# Altium footprint library header.PcbLib: 139 footprints (part 4 of 9)
Each footprint in its own frame and in the unit in brackets; x right, y up, seen from the top. Pads: shape width x height; smd on the part's side, far side on the other; paste and mask are expansions set on the pad; w line width, h text height; cw(c..) or ccw(c..) is an arc to the next point about the centre after c.
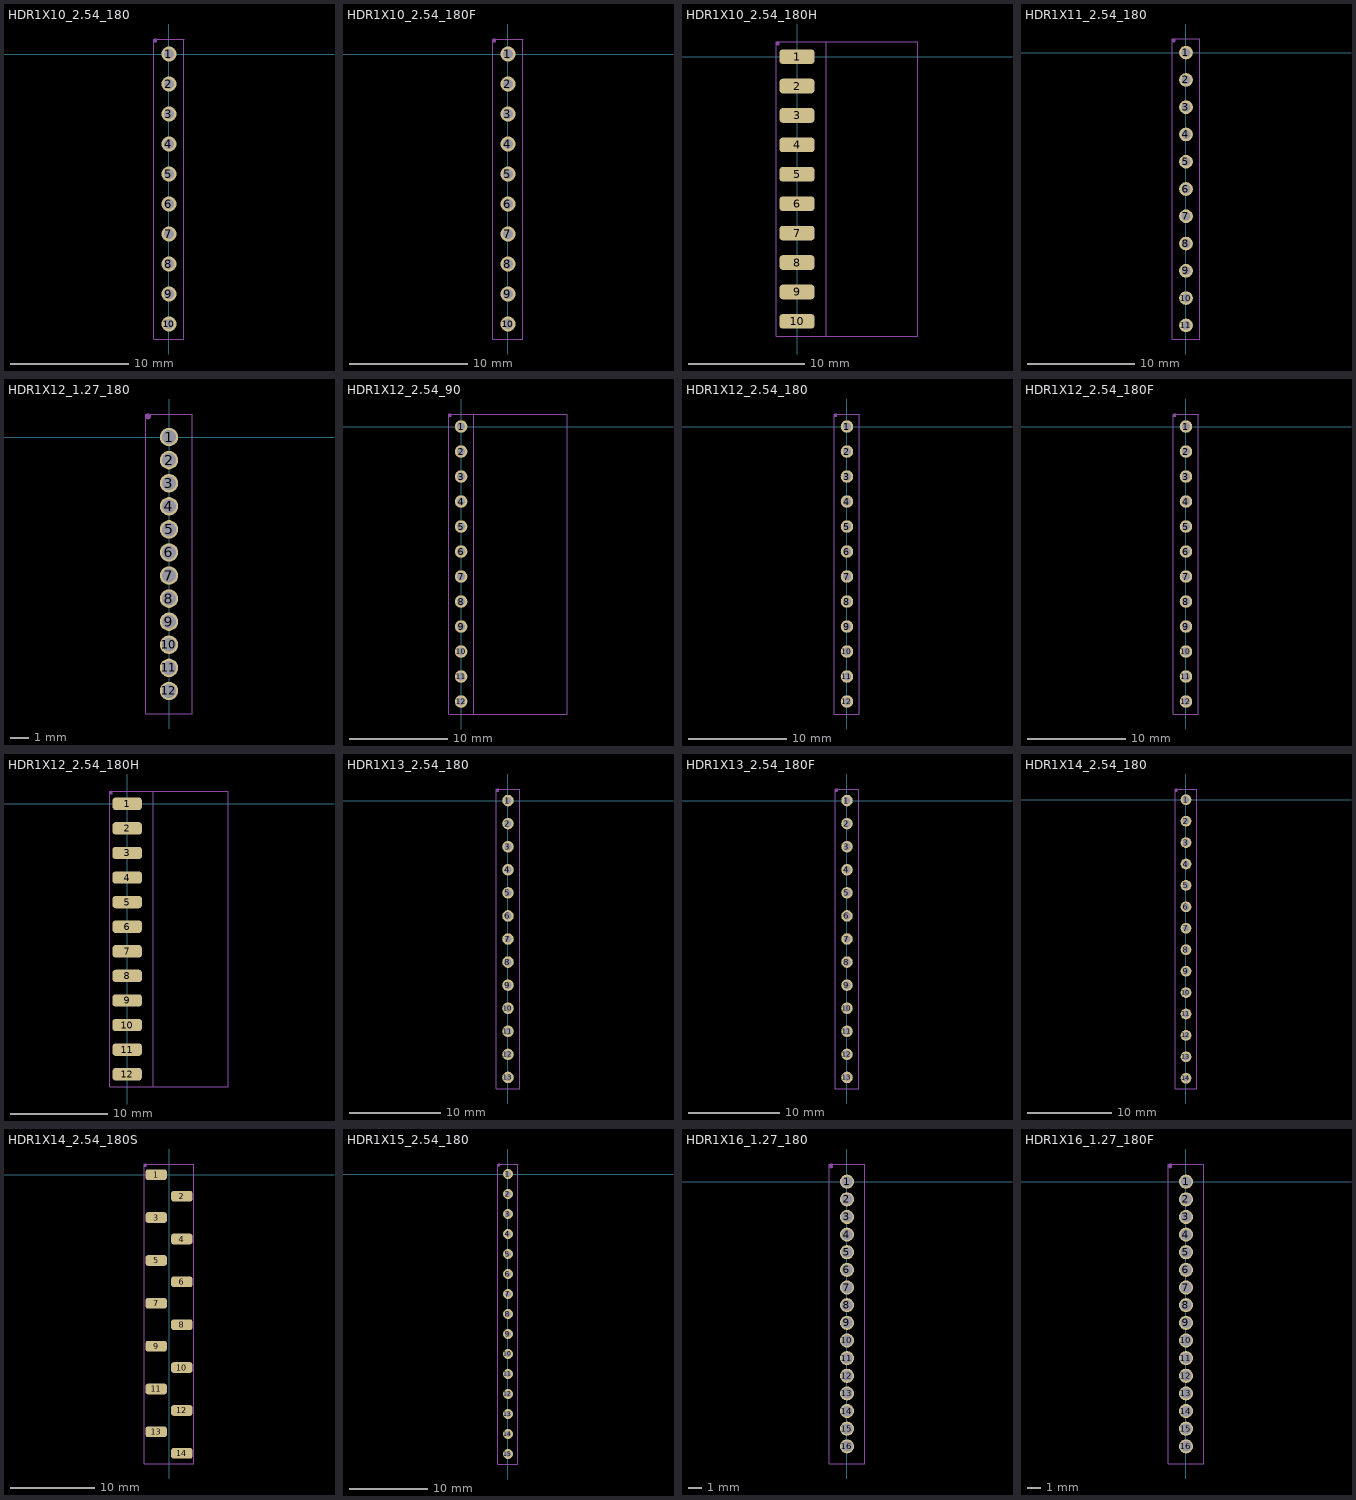
[diagram p3: the footprints below, top view; thin cyan lines are the x and y axes]

## HDR1X10_2.54_180 [mil]
height 169.29
pads (10):
  round 50 hole 32: 1(0,0) 2(0,-100) 3(0,-200) 4(0,-300) 5(0,-400) 6(0,-500) 7(0,-600) 8(0,-700) 9(0,-800) 10(0,-900)
Mechanical 13:
  lines w2: -50,-950 -50,50 50,50 50,-950 -50,-950
Top Component (Mech14):
  circle w2: c-45,45 r5
  region: -45,40 -45.99,40 -47.83,40.76 -49.24,42.17 -50,44.01 -50,45 -50,45.99 -49.24,47.83 -47.83,49.24 -45.99,50 -45,50 -44.01,50 -42.17,49.24 -40.76,47.83 -40,45.99 -40,45 -40,44.01 -40.76,42.17 -42.17,40.76 -44.01,40
  lines w2: -50,-950 50,-950 50,50 -50,50 -50,-950
  text ".Designator" at -31,-470 h80
3D body "pin_header_aw140-eg-g10d.stp": height 322.83, standoff -118.11, extent -49.18,-950 49.18,50

## HDR1X10_2.54_180F [mil]
height 169.29
pads (10):
  round 50 hole 32: 1(0,0) 2(0,-100) 3(0,-200) 4(0,-300) 5(0,-400) 6(0,-500) 7(0,-600) 8(0,-700) 9(0,-800) 10(0,-900)
Mechanical 13:
  lines w2: -50,-950 50,-950 50,50 -50,50 -50,-950
Top Component (Mech14):
  circle w2: c-45,45 r5
  region: -45,40 -45.99,40 -47.83,40.76 -49.24,42.17 -50,44.01 -50,45 -50,45.99 -49.24,47.83 -47.83,49.24 -45.99,50 -45,50 -44.01,50 -42.17,49.24 -40.76,47.83 -40,45.99 -40,45 -40,44.01 -40.76,42.17 -42.17,40.76 -44.01,40
  lines w2: -50,-950 -50,50 50,50 50,-950 -50,-950
  text ".Designator" at -31,-470 h80
3D body "female_header_a-bl254-eg-g10d.stp": height 334.65, standoff -125.98, extent -49.2,-954.92 49.22,54.92

## HDR1X10_2.54_180H [mil]
height 169.29
pads (10):
  rrect50% 120x50 smd: 1(0,0) 2(0,-100) 3(0,-200) 4(0,-300) 5(0,-400) 6(0,-500) 7(0,-600) 8(0,-700) 9(0,-800) 10(0,-900)
Mechanical 13:
  lines w2: -70,-950 -70,50 410,50 410,-950 -70,-950
Top Component (Mech14):
  circle w2: c-65,45 r5
  region: -65,40 -65.99,40 -67.83,40.76 -69.24,42.17 -70,44.01 -70,45 -70,45.99 -69.24,47.83 -67.83,49.24 -65.99,50 -65,50 -64.01,50 -62.17,49.24 -60.76,47.83 -60,45.99 -60,45 -60,44.01 -60.76,42.17 -62.17,40.76 -64.01,40
  lines w2: -70,-950 100,-950 100,50 -70,50 -70,-950
  text ".Designator" at -26,-470 h80
3D body "pin_header_aw140-eg-g10d.stp": height 61.32, standoff -37.05, extent -35,-950 405.94,50

## HDR1X11_2.54_180 [mil]
height 169.29
pads (11):
  round 50 hole 32: 1(0,0) 2(0,-100) 3(0,-200) 4(0,-300) 5(0,-400) 6(0,-500) 7(0,-600) 8(0,-700) 9(0,-800) 10(0,-900) 11(0,-1000)
Mechanical 13:
  lines w2: -50,-1050 50,-1050 50,50 -50,50 -50,-1050
Top Component (Mech14):
  circle w2: c-45,45 r5
  region: -45,40 -45.99,40 -47.83,40.76 -49.24,42.17 -50,44.01 -50,45 -50,45.99 -49.24,47.83 -47.83,49.24 -45.99,50 -45,50 -44.01,50 -42.17,49.24 -40.76,47.83 -40,45.99 -40,45 -40,44.01 -40.76,42.17 -42.17,40.76 -44.01,40
  lines w2: -50,-1050 50,-1050 50,50 -50,50 -50,-1050
  text ".Designator" at -31,-520 h80
3D body "pin_header_aw140-eg-g11d.stp": height 322.83, standoff -118.11, extent -49.18,-1050 49.18,50

## HDR1X12_1.27_180 [mil]
height 169.29
pads (12):
  round 40 hole 30: 1(0,0) 2(0,-50) 3(0,-100) 4(0,-150) 5(0,-200) 6(0,-250) 7(0,-300) 8(0,-350) 9(0,-400) 10(0,-450) 11(0,-500) 12(0,-550)
Mechanical 13:
  lines w2: -50,-600 -50,50 50,50 50,-600 -50,-600
Top Component (Mech14):
  circle w2: c-45,45 r5
  region: -45,40 -45.99,40 -47.83,40.76 -49.24,42.17 -50,44.01 -50,45 -50,45.99 -49.24,47.83 -47.83,49.24 -45.99,50 -45,50 -44.01,50 -42.17,49.24 -40.76,47.83 -40,45.99 -40,45 -40,44.01 -40.76,42.17 -42.17,40.76 -44.01,40
  lines w2: -50,-600 -50,50 50,50 50,-600 -50,-600
  text ".Designator" at -31,-295 h80
3D body "pin_header_a-sl127-eg-g12d.stp": height 210.24, standoff -102.36, extent -49.21,-575 49.21,25

## HDR1X12_2.54_90 [mil]
height 169.29
pads (12):
  round 50 hole 32: 1(0,0) 2(0,-100) 3(0,-200) 4(0,-300) 5(0,-400) 6(0,-500) 7(0,-600) 8(0,-700) 9(0,-800) 10(0,-900) 11(0,-1000) 12(0,-1100)
Mechanical 13:
  lines w2: -50,-1150 425,-1150 425,50 -50,50 -50,-1150
Top Component (Mech14):
  circle w2: c-45,45 r5
  region: -45,40 -45.99,40 -47.83,40.76 -49.24,42.17 -50,44.01 -50,45 -50,45.99 -49.24,47.83 -47.83,49.24 -45.99,50 -45,50 -44.01,50 -42.17,49.24 -40.76,47.83 -40,45.99 -40,45 -40,44.01 -40.76,42.17 -42.17,40.76 -44.01,40
  lines w2: -50,-1150 50,-1150 50,50 -50,50 -50,-1150
  text ".Designator" at -26,-570 h80
3D body "pin_header_aw140-ea-g12g.stp": height 99.21, standoff -93.7, extent -15,-1146.06 423.58,46.06

## HDR1X12_2.54_180 [mil]
height 169.29
pads (12):
  round 50 hole 32: 1(0,0) 2(0,-100) 3(0,-200) 4(0,-300) 5(0,-400) 6(0,-500) 7(0,-600) 8(0,-700) 9(0,-800) 10(0,-900) 11(0,-1000) 12(0,-1100)
Mechanical 13:
  lines w2: -50,-1150 -50,50 50,50 50,-1150 -50,-1150
Top Component (Mech14):
  circle w2: c-45,45 r5
  region: -45,40 -45.99,40 -47.83,40.76 -49.24,42.17 -50,44.01 -50,45 -50,45.99 -49.24,47.83 -47.83,49.24 -45.99,50 -45,50 -44.01,50 -42.17,49.24 -40.76,47.83 -40,45.99 -40,45 -40,44.01 -40.76,42.17 -42.17,40.76 -44.01,40
  lines w2: -50,-1150 -50,50 50,50 50,-1150 -50,-1150
  text ".Designator" at -31,-570 h80
3D body "pin_header_aw140-eg-g12d.stp": height 322.83, standoff -118.11, extent -49.18,-1150 49.18,50

## HDR1X12_2.54_180F [mil]
height 169.29
pads (12):
  round 50 hole 32: 1(0,0) 2(0,-100) 3(0,-200) 4(0,-300) 5(0,-400) 6(0,-500) 7(0,-600) 8(0,-700) 9(0,-800) 10(0,-900) 11(0,-1000) 12(0,-1100)
Mechanical 13:
  lines w2: -50,-1150 50,-1150 50,50 -50,50 -50,-1150
Top Component (Mech14):
  circle w2: c-45,45 r5
  region: -45,40 -45.99,40 -47.83,40.76 -49.24,42.17 -50,44.01 -50,45 -50,45.99 -49.24,47.83 -47.83,49.24 -45.99,50 -45,50 -44.01,50 -42.17,49.24 -40.76,47.83 -40,45.99 -40,45 -40,44.01 -40.76,42.17 -42.17,40.76 -44.01,40
  lines w2: -50,-1150 50,-1150 50,50 -50,50 -50,-1150
  text ".Designator" at -31,-570 h80
3D body "female_header_a-bl254-eg-g12d.stp": height 334.65, standoff -125.98, extent -49.21,-1154.92 49.21,54.92

## HDR1X12_2.54_180H [mil]
height 169.29
pads (12):
  rrect50% 120x50 smd: 1(0,0) 2(0,-100) 3(0,-200) 4(0,-300) 5(0,-400) 6(0,-500) 7(0,-600) 8(0,-700) 9(0,-800) 10(0,-900) 11(0,-1000) 12(0,-1100)
Mechanical 13:
  lines w2: -70,-1150 410,-1150 410,50 -70,50 -70,-1150
Top Component (Mech14):
  circle w2: c-65,45 r5
  region: -65,40 -65.99,40 -67.83,40.76 -69.24,42.17 -70,44.01 -70,45 -70,45.99 -69.24,47.83 -67.83,49.24 -65.99,50 -65,50 -64.01,50 -62.17,49.24 -60.76,47.83 -60,45.99 -60,45 -60,44.01 -60.76,42.17 -62.17,40.76 -64.01,40
  lines w2: -70,-1150 -70,50 105,50 105,-1150 -70,-1150
  text ".Designator" at -31,-570 h80
3D body "pin_header_aw140-eg-g12d.stp": height 49.32, standoff -49.05, extent -35,-1150 405.94,50

## HDR1X13_2.54_180 [mil]
height 169.29
pads (13):
  round 50 hole 32: 1(0,0) 2(0,-100) 3(0,-200) 4(0,-300) 5(0,-400) 6(0,-500) 7(0,-600) 8(0,-700) 9(0,-800) 10(0,-900) 11(0,-1000) 12(0,-1100) 13(0,-1200)
Mechanical 13:
  lines w2: -50,-1250 -50,50 50,50 50,-1250 -50,-1250
Top Component (Mech14):
  circle w2: c-45,45 r5
  region: -45,40 -45.99,40 -47.83,40.76 -49.24,42.17 -50,44.01 -50,45 -50,45.99 -49.24,47.83 -47.83,49.24 -45.99,50 -45,50 -44.01,50 -42.17,49.24 -40.76,47.83 -40,45.99 -40,45 -40,44.01 -40.76,42.17 -42.17,40.76 -44.01,40
  lines w2: -50,-1250 50,-1250 50,50 -50,50 -50,-1250
  text ".Designator" at -31,-620 h80
3D body "pin_header_aw140-eg-g13d.stp": height 322.83, standoff -118.11, extent -49.18,-1250 49.18,50

## HDR1X13_2.54_180F [mil]
height 169.29
pads (13):
  round 50 hole 32: 1(0,0) 2(0,-100) 3(0,-200) 4(0,-300) 5(0,-400) 6(0,-500) 7(0,-600) 8(0,-700) 9(0,-800) 10(0,-900) 11(0,-1000) 12(0,-1100) 13(0,-1200)
Mechanical 13:
  lines w2: -50,-1250 50,-1250 50,50 -50,50 -50,-1250
Top Component (Mech14):
  circle w2: c-45,45 r5
  region: -45,40 -45.99,40 -47.83,40.76 -49.24,42.17 -50,44.01 -50,45 -50,45.99 -49.24,47.83 -47.83,49.24 -45.99,50 -45,50 -44.01,50 -42.17,49.24 -40.76,47.83 -40,45.99 -40,45 -40,44.01 -40.76,42.17 -42.17,40.76 -44.01,40
  lines w2: -50,-1250 -50,50 50,50 50,-1250 -50,-1250
  text ".Designator" at -31,-620 h80
3D body "female_header_a-bl254-eg-g13d.stp": height 334.65, standoff -125.98, extent -49.2,-1254.91 49.22,54.92

## HDR1X14_2.54_180 [mil]
height 169.29
pads (14):
  round 50 hole 32: 1(0,0) 2(0,-100) 3(0,-200) 4(0,-300) 5(0,-400) 6(0,-500) 7(0,-600) 8(0,-700) 9(0,-800) 10(0,-900) 11(0,-1000) 12(0,-1100) 13(0,-1200) 14(0,-1300)
Mechanical 13:
  lines w2: -50,-1350 50,-1350 50,50 -50,50 -50,-1350
Top Component (Mech14):
  circle w2: c-45,45 r5
  region: -45,40 -45.99,40 -47.83,40.76 -49.24,42.17 -50,44.01 -50,45 -50,45.99 -49.24,47.83 -47.83,49.24 -45.99,50 -45,50 -44.01,50 -42.17,49.24 -40.76,47.83 -40,45.99 -40,45 -40,44.01 -40.76,42.17 -42.17,40.76 -44.01,40
  lines w2: -50,-1350 50,-1350 50,50 -50,50 -50,-1350
  text ".Designator" at -31,-670 h80
3D body "pin_header_aw140-eg-g14d.stp": height 322.83, standoff -118.11, extent -49.18,-1350 49.18,50

## HDR1X14_2.54_180S [mil]
height 169.29
pads (14):
  rrect50% 100x50 smd: 1(-60,0) 2(60,-100) 3(-60,-200) 4(60,-300) 5(-60,-400) 6(60,-500) 7(-60,-600) 8(60,-700) 9(-60,-800) 10(60,-900) 11(-60,-1000) 12(60,-1100) 13(-60,-1200) 14(60,-1300)
Mechanical 13:
  lines w2: -115,-1350 115,-1350 115,50 -115,50 -115,-1350
Top Component (Mech14):
  circle w2: c-110,45 r5
  region: -110,40 -110.99,40 -112.83,40.76 -114.24,42.17 -115,44.01 -115,45 -115,45.99 -114.24,47.83 -112.83,49.24 -110.99,50 -110,50 -109.01,50 -107.17,49.24 -105.76,47.83 -105,45.99 -105,45 -105,44.01 -105.76,42.17 -107.17,40.76 -109.01,40
  lines w2: -115,-1350 -115,50 115,50 115,-1350 -115,-1350
  text ".Designator" at -31,-670 h80
3D body "pin_header_A-SL254-EG-G14MP1.stp": height 386.46, standoff -0.94, extent -98.43,-1349.99 98.43,50.01

## HDR1X15_2.54_180 [mil]
height 169.29
pads (15):
  round 50 hole 32: 1(0,0) 2(0,-100) 3(0,-200) 4(0,-300) 5(0,-400) 6(0,-500) 7(0,-600) 8(0,-700) 9(0,-800) 10(0,-900) 11(0,-1000) 12(0,-1100) 13(0,-1200) 14(0,-1300) 15(0,-1400)
Mechanical 13:
  lines w2: -50,-1450 50,-1450 50,50 -50,50 -50,-1450
Top Component (Mech14):
  circle w2: c-45,45 r5
  region: -45,40 -45.99,40 -47.83,40.76 -49.24,42.17 -50,44.01 -50,45 -50,45.99 -49.24,47.83 -47.83,49.24 -45.99,50 -45,50 -44.01,50 -42.17,49.24 -40.76,47.83 -40,45.99 -40,45 -40,44.01 -40.76,42.17 -42.17,40.76 -44.01,40
  lines w2: -50,-1450 -50,50 50,50 50,-1450 -50,-1450
  text ".Designator" at -31,-720 h80
3D body "pin_header_aw140-eg-g15d.stp": height 322.83, standoff -118.11, extent -49.18,-1449.99 49.18,50

## HDR1X16_1.27_180 [mil]
height 169.29
pads (16):
  round 40 hole 30: 1(0,0) 2(0,-50) 3(0,-100) 4(0,-150) 5(0,-200) 6(0,-250) 7(0,-300) 8(0,-350) 9(0,-400) 10(0,-450) 11(0,-500) 12(0,-550) 13(0,-600) 14(0,-650) 15(0,-700) 16(0,-750)
Mechanical 13:
  lines w2: -50,-800 50,-800 50,50 -50,50 -50,-800
Top Component (Mech14):
  circle w2: c-45,45 r5
  region: -45,40 -45.99,40 -47.83,40.76 -49.24,42.17 -50,44.01 -50,45 -50,45.99 -49.24,47.83 -47.83,49.24 -45.99,50 -45,50 -44.01,50 -42.17,49.24 -40.76,47.83 -40,45.99 -40,45 -40,44.01 -40.76,42.17 -42.17,40.76 -44.01,40
  lines w2: -50,-800 50,-800 50,50 -50,50 -50,-800
  text ".Designator" at -31,-395 h80
3D body "pin_header_a-sl127-eg-g16d.stp": height 210.24, standoff -102.36, extent -49.21,-774.99 49.21,25.01

## HDR1X16_1.27_180F [mil]
height 169.29
pads (16):
  round 40 hole 30: 1(0,0) 2(0,-50) 3(0,-100) 4(0,-150) 5(0,-200) 6(0,-250) 7(0,-300) 8(0,-350) 9(0,-400) 10(0,-450) 11(0,-500) 12(0,-550) 13(0,-600) 14(0,-650) 15(0,-700) 16(0,-750)
Mechanical 13:
  lines w2: -50,-800 -50,50 50,50 50,-800 -50,-800
Top Component (Mech14):
  circle w2: c-45,45 r5
  region: -45,40 -45.99,40 -47.83,40.76 -49.24,42.17 -50,44.01 -50,45 -50,45.99 -49.24,47.83 -47.83,49.24 -45.99,50 -45,50 -44.01,50 -42.17,49.24 -40.76,47.83 -40,45.99 -40,45 -40,44.01 -40.76,42.17 -42.17,40.76 -44.01,40
  lines w2: -50,-800 -50,50 50,50 50,-800 -50,-800
  text ".Designator" at -31,-395 h80
3D body "female_header_a-bl127-eg-g16d.stp": height 133.86, standoff -94.49, extent -35.43,-782.88 35.44,32.88